# Altium footprint library 通讯系列IC.PcbLib: 20 footprints (part 2 of 2)
Each footprint in its own frame and in the unit in brackets; x right, y up, seen from the top. Pads: shape width x height; smd on the part's side, far side on the other; paste and mask are expansions set on the pad; w line width, h text height; cw(c..) or ccw(c..) is an arc to the next point about the centre after c.
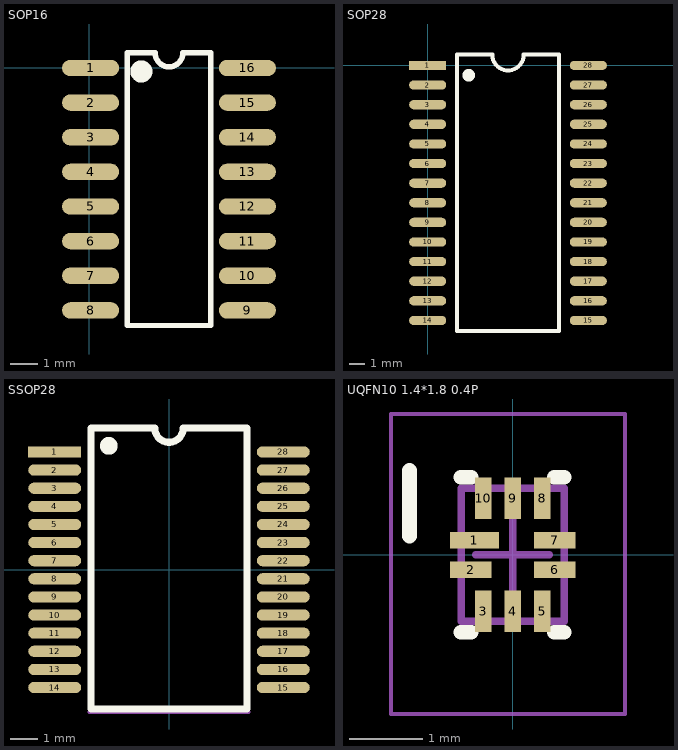
[diagram p1: the footprints below, top view; thin cyan lines are the x and y axes]

## SOP16 [mm]
pads (16):
  oval 2.1x0.6 smd: 1(0.046,0) 2(0.046,-1.27) 3(0.046,-2.54) 4(0.046,-3.81) 5(0.046,-5.08) 6(0.046,-6.35) 7(0.046,-7.62) 8(0.046,-8.89) 9(5.796,-8.89) 10(5.796,-7.62) 11(5.796,-6.35) 12(5.796,-5.08) 13(5.796,-3.81) 14(5.796,-2.54) 15(5.796,-1.27) 16(5.796,0)
Top Overlay:
  circle w0.5: c1.905,-0.127 r0.155
  lines w0.2: 1.397,0.555 1.397,-9.445 4.445,-9.445 4.445,0.555
  lines w0.203: 1.397,0.555 2.413,0.555 ccw(c2.921,0.555) 2.921,0.047 ccw(c2.921,0.555) 3.429,0.555 4.445,0.555
3D body "SOP16.STEP": height 1.9, standoff 0, extent -0.152,-9.47 5.853,0.53

## SOP28 [mm]
pads (28):
  rect 2.4x0.6 smd: 1(0.007,0)
  oval 2.4x0.6 smd: 2(0.007,-1.27) 3(0.007,-2.54) 4(0.007,-3.81) 5(0.007,-5.08) 6(0.007,-6.35) 7(0.007,-7.62) 8(0.007,-8.89) 9(0.007,-10.16) 10(0.007,-11.43) 11(0.007,-12.7) 12(0.007,-13.97) 13(0.007,-15.24) 14(0.007,-16.51) 15(10.407,-16.51) 16(10.407,-15.24) 17(10.407,-13.97) 18(10.407,-12.7) 19(10.407,-11.43) 20(10.407,-10.16) 21(10.407,-8.89) 22(10.407,-7.62) 23(10.407,-6.35) 24(10.407,-5.08) 25(10.407,-3.81) 26(10.407,-2.54) 27(10.407,-1.27) 28(10.407,0)
Top Overlay:
  circle w0.5: c2.667,-0.635 r0.155
  lines w0.254: 1.905,-17.205 8.509,-17.205 8.509,0.695 6.223,0.695 cw(c5.207,0.695) 4.191,0.695 1.905,0.695 1.905,-17.205
3D body "SOP28.STEP": height 2.7, standoff 0, extent 0.054,-17.265 10.36,0.635

## SSOP28 [mm]
pads (28):
  rect 1.9x0.4 smd: 1(-4.1,4.225)
  oval 1.9x0.4 smd: 2(-4.1,3.575) 3(-4.1,2.925) 4(-4.1,2.275) 5(-4.1,1.625) 6(-4.1,0.975) 7(-4.1,0.325) 8(-4.1,-0.325) 9(-4.1,-0.975) 10(-4.1,-1.625) 11(-4.1,-2.275) 12(-4.1,-2.925) 13(-4.1,-3.575) 14(-4.1,-4.225) 15(4.1,-4.225) 16(4.1,-3.575) 17(4.1,-2.925) 18(4.1,-2.275) 19(4.1,-1.625) 20(4.1,-0.975) 21(4.1,-0.325) 22(4.1,0.325) 23(4.1,0.975) 24(4.1,1.625) 25(4.1,2.275) 26(4.1,2.925) 27(4.1,3.575) 28(4.1,4.225)
Top Overlay:
  circle w0.381: c-2.159,4.445 r0.127
  lines w0.254: -2.804,-5 -2.804,5.08 -0.508,5.08 ccw(c0,5.08) 0.508,5.08 2.796,5.08 2.796,-5 -2.804,-5
Mechanical 13:
  lines w0.15: -2.85,-5.1 2.85,-5.1
3D body "SSOP28_M.STEP": height 1.65, standoff -0.03, extent -3.852,-5.12 3.852,5.08

## UQFN10 1.4*1.8 0.4P [mm] "QFN, 10-Leads, Body 1.40x1.80mm, Pitch 0.40mm, Thermal Pad 1.02x0.63mm, IPC Medium Density"
height 0.55
pads (10):
  rect 0.663x0.225 smd: 1(-0.52,0.2)
  rect 0.563x0.225 smd: 2(-0.569,-0.2) 6(0.569,-0.2) 7(0.569,0.2)
  rect 0.225x0.563 smd: 3(-0.4,-0.768) 4(0,-0.768) 5(0.4,-0.768) 8(0.4,0.768) 9(0,0.768) 10(-0.4,0.768)
Top Overlay:
  lines w0.2: -0.7,-1.05 -0.563,-1.05 ; -0.7,1.05 -0.563,1.05 ; 0.563,-1.05 0.7,-1.05 ; 0.563,1.05 0.7,1.05
  lines w0.203: -1.397,0.254 -1.397,1.143
Mechanical 13:
  lines w0.1: -0.7,-0.9 0.7,-0.9 0.7,0.9 -0.7,0.9 -0.7,-0.9
Mechanical 15:
  lines w0.05: -1.651,-2.159 1.524,-2.159 1.524,1.909 -1.651,1.909 -1.651,-2.159
  lines w0.1: -0.5,0 0.5,0 ; 0,-0.5 0,0.5
3D body "QFN40P140X180X55_HS-11N.step": height 0.55, standoff 0, extent -0.8,-1 0.8,1